# Altium footprint library BaseStation.PcbLib: 68 footprints (part 3 of 5)
Each footprint in its own frame and in the unit in brackets; x right, y up, seen from the top. Pads: shape width x height; smd on the part's side, far side on the other; paste and mask are expansions set on the pad; w line width, h text height; cw(c..) or ccw(c..) is an arc to the next point about the centre after c.
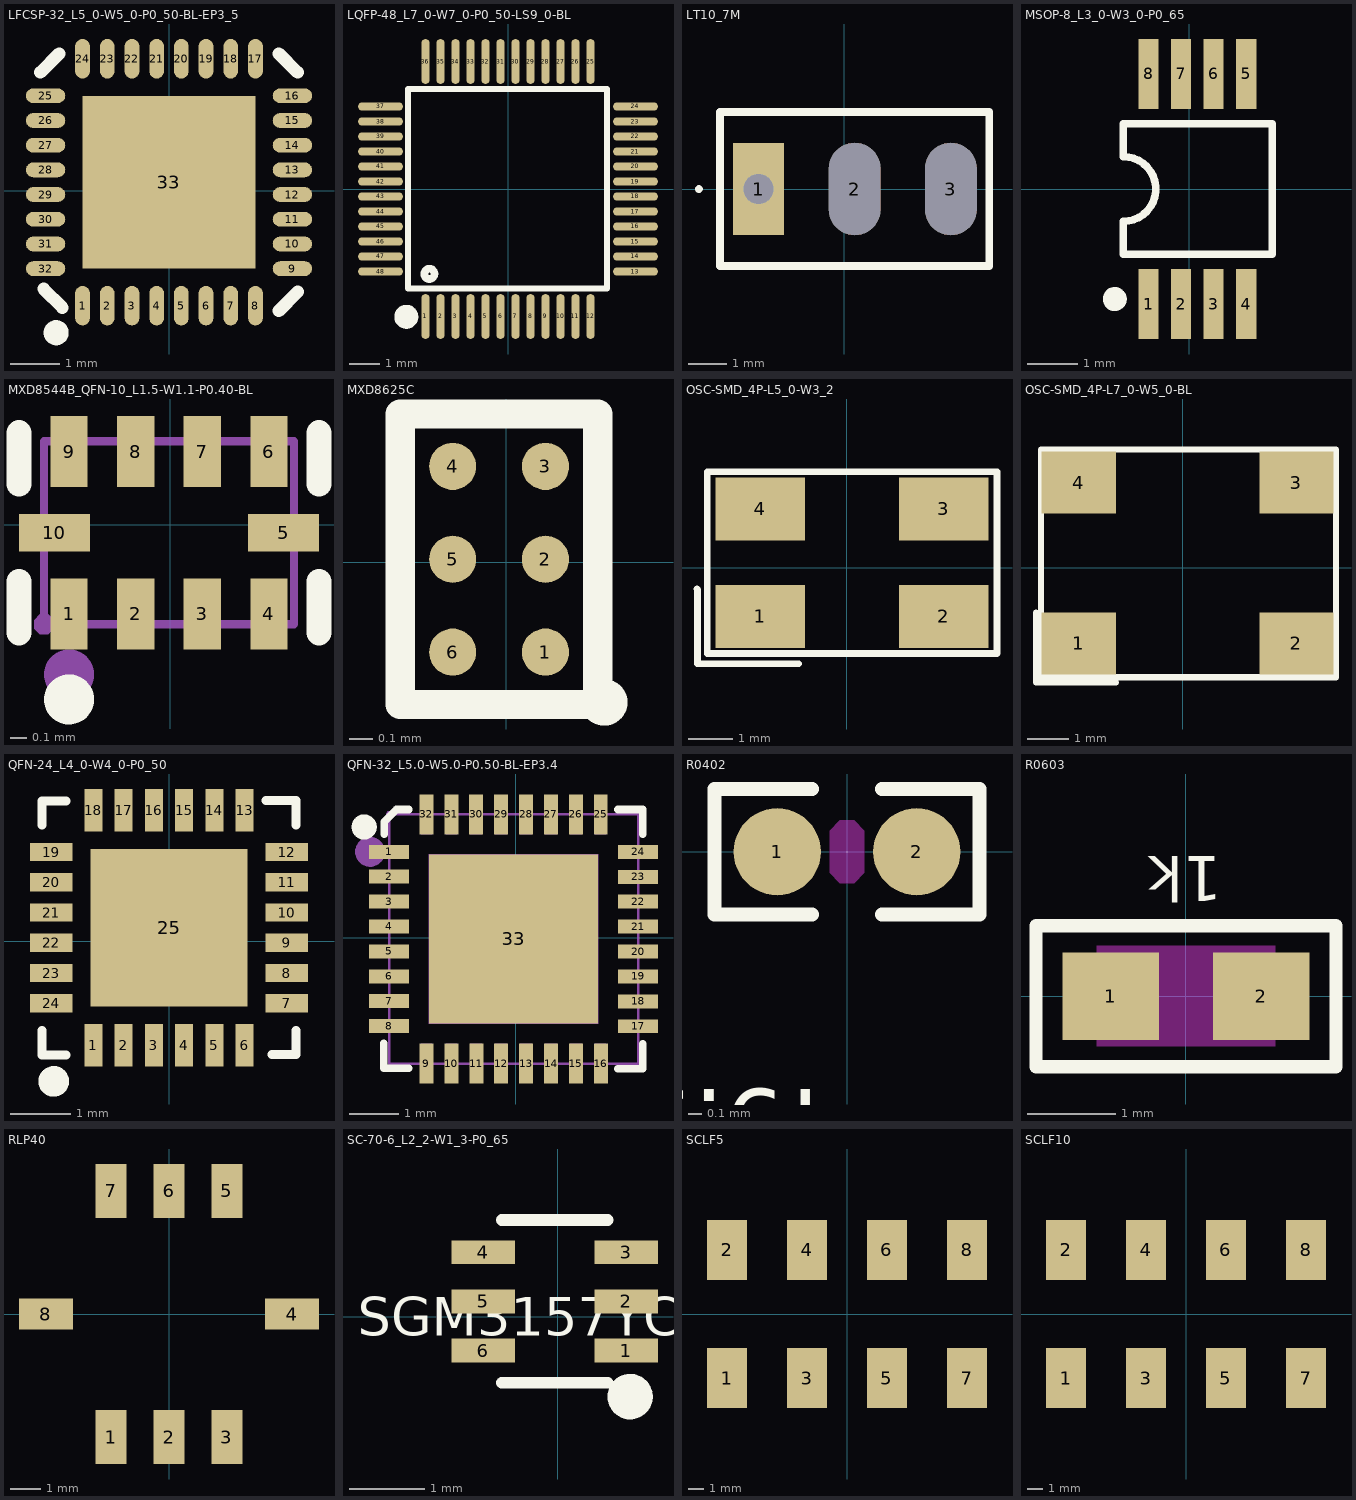
[diagram p2: the footprints below, top view; thin cyan lines are the x and y axes]

## LFCSP-32_L5_0-W5_0-P0_50-BL-EP3_5 [mil] "LFCSP-32_L5_0-W5_0-P0_50-BL-EP3_5"
pads (33):
  oval 11.8x31.5 smd: 1(-68.9,-91.51) 2(-49.22,-91.51) 3(-29.53,-91.51) 4(-9.85,-91.51) 5(9.84,-91.51) 6(29.52,-91.51) 7(49.21,-91.51) 8(68.9,-91.51) 17(68.9,105.34) 18(49.21,105.34) 19(29.52,105.34) 20(9.84,105.34) 21(-9.85,105.34) 22(-29.53,105.34) 23(-49.22,105.34) 24(-68.9,105.34)
  oval 31.5x11.8 smd: 9(98.42,-61.97) 10(98.42,-42.3) 11(98.42,-22.61) 12(98.42,-2.93) 13(98.42,16.76) 14(98.42,36.45) 15(98.42,56.13) 16(98.42,75.81) 25(-98.43,75.81) 26(-98.43,56.13) 27(-98.43,36.45) 28(-98.43,16.76) 29(-98.43,-2.93) 30(-98.43,-22.61) 31(-98.43,-42.3) 32(-98.43,-61.97)
  rect 137.79x137.79 smd: 33(-0.01,6.91)
Top Overlay:
  circle w10: c-90.01,-113.09 r5
  lines w10: -102.51,94.41 -87.51,109.41 ; -100.01,-78.09 -85.01,-93.09 ; 87.49,-95.59 102.49,-80.59 ; 87.49,109.41 102.49,94.41

## LQFP-48_L7_0-W7_0-P0_50-LS9_0-BL [mm] "LQFP-48_L7_0-W7_0-P0_50-LS9_0-BL"
pads (48):
  oval 0.27x1.5 smd: 1(-2.75,-4.25) 2(-2.25,-4.25) 3(-1.75,-4.25) 4(-1.25,-4.25) 5(-0.75,-4.25) 6(-0.25,-4.25) 7(0.25,-4.25) 8(0.75,-4.25) 9(1.25,-4.25) 10(1.75,-4.25) 11(2.25,-4.25) 12(2.75,-4.25) 25(2.75,4.25) 26(2.25,4.25) 27(1.75,4.25) 28(1.25,4.25) 29(0.75,4.25) 30(0.25,4.25) 31(-0.25,4.25) 32(-0.75,4.25) 33(-1.25,4.25) 34(-1.75,4.25) 35(-2.25,4.25) 36(-2.75,4.25)
  oval 1.5x0.27 smd: 13(4.25,-2.75) 14(4.25,-2.25) 15(4.25,-1.75) 16(4.25,-1.25) 17(4.25,-0.75) 18(4.25,-0.25) 19(4.25,0.25) 20(4.25,0.75) 21(4.25,1.25) 22(4.25,1.75) 23(4.25,2.25) 24(4.25,2.75) 37(-4.25,2.75) 38(-4.25,2.25) 39(-4.25,1.75) 40(-4.25,1.25) 41(-4.25,0.75) 42(-4.25,0.25) 43(-4.25,-0.25) 44(-4.25,-0.75) 45(-4.25,-1.25) 46(-4.25,-1.75) 47(-4.25,-2.25) 48(-4.25,-2.75)
Top Overlay:
  circle w0.254: c-2.62,-2.83 r0.17
  lines w0.2: -2.896,3.34 3.302,3.34 3.302,-3.315 -3.327,-3.315 -3.327,3.34 -2.565,3.34
  lines w0.4: -3.39,-4.06 ccw(c-3.389,-4.26) -3.387,-4.06

## LT10_7M [mm] "LT10_7M"
pads (3):
  rect 1.337x2.4 hole 0.78: 1(-2.225,0)
  oval 1.337x2.4 hole 1.337 slot 2.4 at 90 deg: 2(0.275,0) 3(2.775,0)
Top Overlay:
  lines w0.1: -3.825,0 ccw(c-3.775,0) -3.725,0 ccw(c-3.775,0) -3.825,0
  lines w0.2: -3.225,-2 3.775,-2 3.775,2 -3.225,2 -3.225,-2

## MSOP-8_L3_0-W3_0-P0_65 [mm] "MSOP-8_L3_0-W3_0-P0_65"
pads (8):
  rect 0.406x1.397 smd: 1(-0.818,-2.3) 2(-0.168,-2.3) 3(0.482,-2.3) 4(1.133,-2.3) 5(1.133,2.3) 6(0.482,2.3) 7(-0.168,2.3) 8(-0.818,2.3)
Top Overlay:
  circle w0.24: c-1.493,-2.2 r0.12
  lines w0.15: -1.321,-1.3 -1.321,-0.648 ccw(c-1.321,0) -1.321,0.648 -1.321,1.3 1.657,1.3 1.657,-1.3 -1.321,-1.3

## MXD8544B_QFN-10_L1.5-W1.1-P0.40-BL [mm]
pads (10):
  rect 0.224x0.425 smd paste+0.051: 1(-0.609,-0.535) 2(-0.209,-0.535) 3(0.191,-0.535) 4(0.591,-0.535) 6(0.591,0.439) 7(0.191,0.439) 8(-0.209,0.439) 9(-0.609,0.439)
  rect 0.425x0.224 smd paste+0.051: 5(0.679,-0.048) 10(-0.697,-0.048)
Top Overlay:
  circle w0.15: c-0.609,-1.048 r0.075
  lines w0.152: -0.909,-0.648 -0.909,-0.34 ; -0.909,0.244 -0.909,0.552 ; 0.891,-0.648 0.891,-0.34 ; 0.891,0.244 0.891,0.552
Mechanical 2:
  circle w0.15: c-0.609,-0.898 r0.075
Mechanical 6:
  lines w0.051: -0.759,-0.598 -0.759,0.502 0.741,0.502 0.741,-0.598 -0.759,-0.598
Mechanical 8:
  region: -0.699,-0.598 -0.699,-0.623 -0.734,-0.658 -0.784,-0.658 -0.819,-0.623 -0.819,-0.598 -0.819,-0.573 -0.784,-0.538 -0.734,-0.538 -0.699,-0.573
Mechanical 9:
  region: -0.709,-0.598 -0.709,-0.348 -0.509,-0.348 -0.509,-0.598
  region: -0.309,-0.598 -0.309,-0.348 -0.109,-0.348 -0.109,-0.598
  region: 0.091,-0.598 0.091,-0.348 0.291,-0.348 0.291,-0.598
  region: 0.491,-0.598 0.491,-0.348 0.691,-0.348 0.691,-0.598
  region: 0.491,-0.148 0.491,0.052 0.741,0.052 0.741,-0.148
  region: 0.491,0.502 0.491,0.252 0.691,0.252 0.691,0.502
  region: 0.091,0.502 0.091,0.252 0.291,0.252 0.291,0.502
  region: -0.309,0.502 -0.309,0.252 -0.109,0.252 -0.109,0.502
  region: -0.709,0.502 -0.709,0.252 -0.509,0.252 -0.509,0.502
  region: -0.509,-0.148 -0.509,0.052 -0.759,0.052 -0.759,-0.148

## MXD8625C [mil] "MXD8625C"
pads (6):
  round 8 smd: 1(6.62,-15.21) 2(6.62,0.54) 3(6.62,16.29) 4(-9.13,16.29) 5(-9.13,0.54) 6(-9.13,-15.21)
Top Overlay:
  circle w3.94: c16.59,-23.75 r1.97
  lines w5: -18.04,-24.11 15.52,-24.11 15.52,25.19 -18.04,25.19 -18.04,-24.11

## OSC-SMD_4P-L5_0-W3_2 [mm] "OSC-SMD_4P-L5_0-W3_2"
pads (4):
  rect 2x1.4 smd: 1(-1.936,-1.086) 2(2.164,-1.086) 3(2.164,1.314) 4(-1.936,1.314)
Top Overlay:
  lines w0.152: -3.35,-0.476 -3.341,-0.485 -3.341,-2.144 -3.143,-2.144 -1.085,-2.144 ; -3.122,-1.915 -2.914,-1.915 3.35,-1.915 3.35,2.144 -3.122,2.144 -3.122,-1.915

## OSC-SMD_4P-L7_0-W5_0-BL [mm] "OSC-SMD_4P-L7_0-W5_0-BL"
pads (4):
  rect 1.8x1.5 smd mask+0: 1(-2.526,-1.836) 2(2.754,-1.836) 3(2.754,2.064) 4(-2.526,2.064)
Top Overlay:
  lines w0.152: -3.564,-1.086 -3.564,-2.785 -1.626,-2.785 ; -3.444,-2.655 -3.444,2.868 3.713,2.868 3.713,-2.655 -3.444,-2.655

## QFN-24_L4_0-W4_0-P0_50 [mm] "QFN-24_L4_0-W4_0-P0_50"
pads (25):
  rect 0.3x0.7 smd: 1(-1.25,-1.716) 2(-0.75,-1.716) 3(-0.25,-1.716) 4(0.25,-1.716) 5(0.75,-1.716) 6(1.25,-1.716) 13(1.25,2.168) 14(0.75,2.168) 15(0.25,2.168) 16(-0.25,2.168) 17(-0.75,2.168) 18(-1.25,2.168)
  rect 0.7x0.3 smd: 7(1.948,-1.024) 8(1.948,-0.524) 9(1.948,-0.024) 10(1.948,0.476) 11(1.948,0.976) 12(1.948,1.476) 19(-1.948,1.476) 20(-1.948,0.976) 21(-1.948,0.476) 22(-1.948,-0.024) 23(-1.948,-0.524) 24(-1.948,-1.024)
  rect 2.6x2.6 smd: 25(0.001,0.225)
Top Overlay:
  circle w0.254: c-1.905,-2.314 r0.127
  lines w0.15: -2.1,-1.474 -2.1,-1.879 -1.7,-1.879 ; -2.1,1.921 -2.1,2.321 -1.7,2.321 ; 1.6,2.326 2.1,2.326 2.1,1.926 ; 1.7,-1.874 2.1,-1.874 2.1,-1.474

## QFN-32_L5.0-W5.0-P0.50-BL-EP3.4 [mm]
pads (33):
  rect 0.8x0.28 smd paste-100 mask+0.05: 1(-2.54,1.722) 2(-2.54,1.223) 3(-2.54,0.723) 4(-2.54,0.223) 5(-2.54,-0.277) 6(-2.54,-0.777) 7(-2.54,-1.277) 8(-2.54,-1.777) 17(2.46,-1.78) 18(2.46,-1.279) 19(2.46,-0.78) 20(2.46,-0.279) 21(2.46,0.22) 22(2.46,0.721) 23(2.46,1.22) 24(2.46,1.721)
  rect 0.28x0.8 smd paste-100 mask+0.05: 9(-1.788,-2.528) 10(-1.288,-2.528) 11(-0.788,-2.528) 12(-0.288,-2.528) 13(0.212,-2.528) 14(0.712,-2.528) 15(1.212,-2.528) 16(1.712,-2.528) 25(1.71,2.472) 26(1.21,2.472) 27(0.71,2.472) 28(0.21,2.472) 29(-0.29,2.472) 30(-0.79,2.472) 31(-1.29,2.472) 32(-1.79,2.472)
  rect 3.4x3.4 smd paste-100 mask+0.05: 33(-0.04,-0.028)
Top Overlay:
  circle w0.254: c-3.038,2.22 r0.125
  lines w0.152: -2.642,-2.126 -2.642,-2.626 -2.143,-2.626 ; -2.64,2.072 -2.64,2.322 -2.39,2.572 -2.14,2.572 ; 2.058,-2.63 2.557,-2.63 2.557,-2.13 ; 2.058,2.571 2.557,2.571 2.557,2.071
Top Paste:
  region: -2.94,-0.917 -2.14,-0.917 -2.14,-0.637 -2.94,-0.637
  region: -2.94,-0.417 -2.14,-0.417 -2.14,-0.137 -2.94,-0.137
  region: -2.14,-1.137 -2.94,-1.137 -2.94,-1.417 -2.14,-1.417
  region: -2.94,0.083 -2.14,0.083 -2.14,0.363 -2.94,0.363
  region: -2.94,0.583 -2.14,0.583 -2.14,0.863 -2.94,0.863
  region: -2.94,1.083 -2.14,1.083 -2.14,1.363 -2.94,1.363
  region: -2.14,-1.637 -2.94,-1.637 -2.94,-1.917 -2.14,-1.917
  region: -2.94,1.582 -2.14,1.582 -2.14,1.862 -2.94,1.862
  region: -1.93,2.072 -1.65,2.072 -1.65,2.872 -1.93,2.872
  region: -1.648,-2.128 -1.928,-2.128 -1.928,-2.928 -1.648,-2.928
  region: -1.43,2.072 -1.15,2.072 -1.15,2.872 -1.43,2.872
  region: -1.148,-2.128 -1.428,-2.128 -1.428,-2.928 -1.148,-2.928
  region: -0.93,2.072 -0.65,2.072 -0.65,2.872 -0.93,2.872
  region: -0.648,-2.128 -0.928,-2.128 -0.928,-2.928 -0.648,-2.928
  region: -0.43,2.072 -0.15,2.072 -0.15,2.872 -0.43,2.872
  region: -0.148,-2.128 -0.428,-2.128 -0.428,-2.928 -0.148,-2.928
  region: 0.07,2.072 0.35,2.072 0.35,2.872 0.07,2.872
  region: 0.352,-2.128 0.072,-2.128 0.072,-2.928 0.352,-2.928
  region: 0.57,2.072 0.85,2.072 0.85,2.872 0.57,2.872
  region: 0.852,-2.128 0.572,-2.128 0.572,-2.928 0.852,-2.928
  region: 1.07,2.072 1.35,2.072 1.35,2.872 1.07,2.872
  region: 1.352,-2.128 1.072,-2.128 1.072,-2.928 1.352,-2.928
  region: 1.57,2.072 1.85,2.072 1.85,2.872 1.57,2.872
  region: 1.852,-2.128 1.572,-2.128 1.572,-2.928 1.852,-2.928
  region: 2.06,0.581 2.86,0.581 2.86,0.861 2.06,0.861
  region: 2.06,0.08 2.86,0.08 2.86,0.36 2.06,0.36
  region: 2.86,1.36 2.06,1.36 2.06,1.08 2.86,1.08
  region: 2.06,-0.419 2.86,-0.419 2.86,-0.139 2.06,-0.139
  region: 2.06,-0.92 2.86,-0.92 2.86,-0.64 2.06,-0.64
  region: 2.06,-1.419 2.86,-1.419 2.86,-1.139 2.06,-1.139
  region: 2.86,1.861 2.06,1.861 2.06,1.581 2.86,1.581
  region: 2.06,-1.92 2.86,-1.92 2.86,-1.64 2.06,-1.64
  region: -1.4,-1.388 -1.4,1.332 1.32,1.332 1.32,-1.388
Mechanical 2:
  circle w0.3: c-2.92,1.722 r0.15
Mechanical 6:
  lines w0.051: -2.54,-2.528 -2.54,2.472 2.46,2.472 2.46,-2.528 -2.54,-2.528
Mechanical 8:
  region: -2.565,2.412 -2.6,2.447 -2.6,2.497 -2.565,2.532 -2.515,2.532 -2.48,2.497 -2.48,2.447 -2.515,2.412
Mechanical 9:
  region: -1.74,-1.728 -1.74,1.672 1.66,1.672 1.66,-1.728
  region: -2.54,1.837 -2.14,1.837 -2.14,1.607 -2.54,1.607
  region: -2.54,1.337 -2.14,1.337 -2.14,1.107 -2.54,1.107
  region: -2.54,0.837 -2.14,0.837 -2.14,0.607 -2.54,0.607
  region: -2.54,0.337 -2.14,0.337 -2.14,0.107 -2.54,0.107
  region: -2.54,-0.163 -2.14,-0.163 -2.14,-0.393 -2.54,-0.393
  region: -2.54,-0.663 -2.14,-0.663 -2.14,-0.893 -2.54,-0.893
  region: -2.54,-1.163 -2.14,-1.163 -2.14,-1.393 -2.54,-1.393
  region: -2.54,-1.663 -2.14,-1.663 -2.14,-1.893 -2.54,-1.893
  region: -1.905,-2.128 -1.675,-2.128 -1.675,-2.528 -1.905,-2.528
  region: -1.405,-2.128 -1.175,-2.128 -1.175,-2.528 -1.405,-2.528
  region: -0.905,-2.128 -0.675,-2.128 -0.675,-2.528 -0.905,-2.528
  region: -0.405,-2.128 -0.175,-2.128 -0.175,-2.528 -0.405,-2.528
  region: 0.095,-2.128 0.325,-2.128 0.325,-2.528 0.095,-2.528
  region: 0.595,-2.128 0.825,-2.128 0.825,-2.528 0.595,-2.528
  region: 1.095,-2.128 1.325,-2.128 1.325,-2.528 1.095,-2.528
  region: 1.595,-2.128 1.825,-2.128 1.825,-2.528 1.595,-2.528
  region: 2.46,-1.663 2.06,-1.663 2.06,-1.893 2.46,-1.893
  region: 2.46,-1.163 2.06,-1.163 2.06,-1.393 2.46,-1.393
  region: 2.46,-0.663 2.06,-0.663 2.06,-0.893 2.46,-0.893
  region: 2.46,-0.163 2.06,-0.163 2.06,-0.393 2.46,-0.393
  region: 2.46,0.337 2.06,0.337 2.06,0.107 2.46,0.107
  region: 2.46,0.837 2.06,0.837 2.06,0.607 2.46,0.607
  region: 2.46,1.337 2.06,1.337 2.06,1.107 2.46,1.107
  region: 2.46,1.837 2.06,1.837 2.06,1.607 2.46,1.607
  region: 1.595,2.072 1.825,2.072 1.825,2.472 1.595,2.472
  region: 1.095,2.072 1.325,2.072 1.325,2.472 1.095,2.472
  region: 0.595,2.072 0.825,2.072 0.825,2.472 0.595,2.472
  region: 0.095,2.072 0.325,2.072 0.325,2.472 0.095,2.472
  region: -0.405,2.072 -0.175,2.072 -0.175,2.472 -0.405,2.472
  region: -0.905,2.072 -0.675,2.072 -0.675,2.472 -0.905,2.472
  region: -1.405,2.072 -1.175,2.072 -1.175,2.472 -1.405,2.472
  region: -1.905,2.072 -1.675,2.072 -1.675,2.472 -1.905,2.472

## R0402 [mil] "R0402"
pads (2):
  round 25 smd: 1(-20,0) 2(20,0)
Top Layer keep-out:
  region: 5,4 5,-4 5,-6.07 2.07,-9 -2.07,-9 -5,-6.07 -5,-4 -5,4 -5,6.07 -2.07,9 2.07,9 5,6.07
Top Overlay:
  lines w4: -10,-18 -38,-18 -38,18 -10,18 ; 10,-18 38,-18 38,18 10,18
  text "49.9R" at -0.17,-68 h20

## R0603 [mil] "R0603"
pads (2):
  rect 43x39 smd: 1(-33.5,0) 2(33.5,0)
Top Layer keep-out:
  region: -9.1,22.4 -9.1,-22.1 9.5,-22.1 9.5,22.4
  region: -39.8,22.4 -39.8,-22.4 39.8,-22.4 39.8,22.4
Top Overlay:
  lines w6: -66.9,-31.5 66.9,-31.5 66.9,31.5 -66.9,31.5 -66.9,-31.5
  text "1k" at 16.12,62.5 h20

## RLP40 [mm]
pads (8):
  rect 1.02x1.78 smd: 1(-1.91,-4.065) 2(0,-4.065) 3(1.91,-4.065) 5(1.91,4.065) 6(0,4.065) 7(-1.91,4.065)
  rect 1.78x1.02 smd: 4(4.065,0) 8(-4.065,0)

## SC-70-6_L2_2-W1_3-P0_65 [mm] "SC-70-6_L2_2-W1_3-P0_65"
pads (6):
  rect 0.841x0.315 smd: 1(0.905,-0.446) 2(0.905,0.204) 3(0.905,0.854) 4(-0.987,0.854) 5(-0.987,0.204) 6(-0.987,-0.446)
Top Overlay:
  circle w0.3: c0.957,-1.056 r0.15
  lines w0.152: -0.742,-0.873 0.66,-0.873 ; -0.742,1.28 0.66,1.28
  text ".TOL" at -0.041,0.204 h2.5
  text ".PARTNO" at -0.041,0.204 h2.5
  text "SGM3157YC6/TR" at -2.642,-0.254 h0.51

## SCLF5 [mm]
pads (8):
  rect 2.54x3.81 smd: 1(-7.62,-4.065) 2(-7.62,4.065) 3(-2.54,-4.065) 4(-2.54,4.065) 5(2.54,-4.065) 6(2.54,4.065) 7(7.62,-4.065) 8(7.62,4.065)

## SCLF10 [mm]
pads (8):
  rect 2.54x3.81 smd: 1(-7.62,-4.065) 2(-7.62,4.065) 3(-2.54,-4.065) 4(-2.54,4.065) 5(2.54,-4.065) 6(2.54,4.065) 7(7.62,-4.065) 8(7.62,4.065)